# Altium schematic symbol library PRPC003SAAN-RC.SchLib: 1 symbol
Pins are listed as number, name and electrical type; pins without a type are passive.

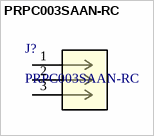
[diagram p0: symbol PRPC003SAAN-RC]

## PRPC003SAAN-RC
designator J?
Description; Manufacturer_Name: Sullins; Copyright: Copyright (C) 2025 Ultra Librarian. All rights reserved.; Manufacturer_Part_Number: PRPC003SAAN-RC; RefDes: RefDes; Type: Type
footprint CONN_PRPC003SAAN-RC_SUL
pins: 1, 2, 3